# Altium integrated library Integrated_Library11.IntLib: 17 symbols
Pins are listed as number, name and electrical type; pins without a type are passive.

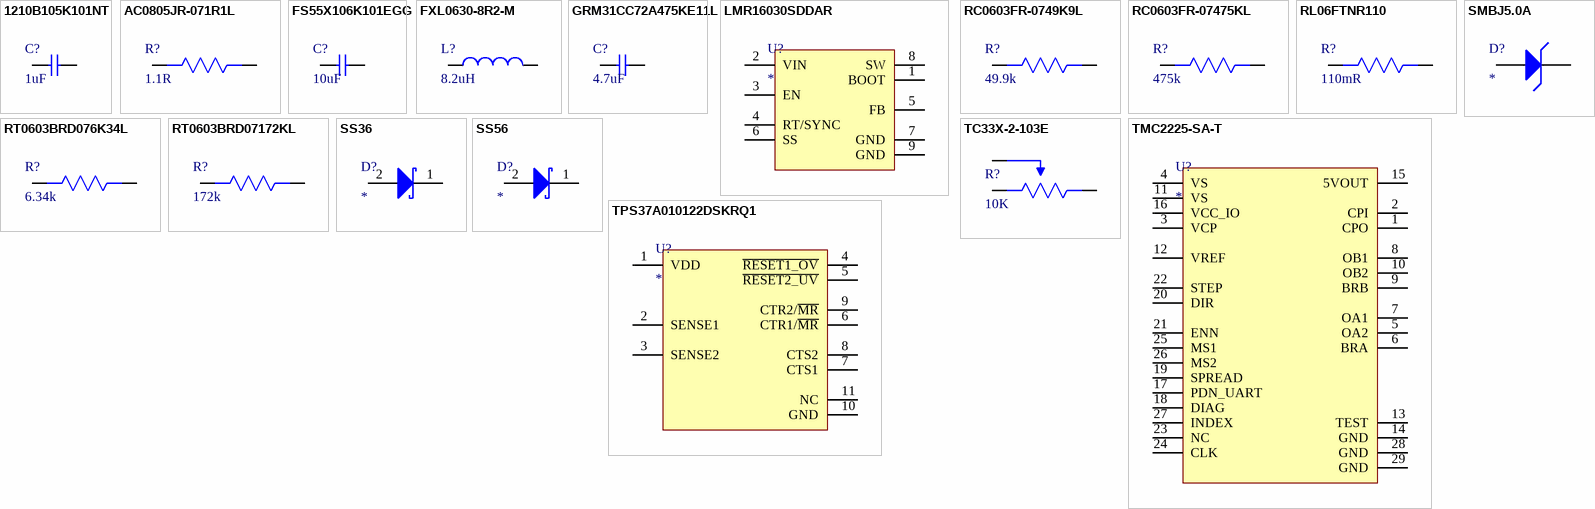
[diagram p0: symbols 1210B105K101NT to TPS37A010122DSKRQ1]

## 1210B105K101NT
designator C?, comment 1uF
100V 1uF X7R ±10% 1210 Multilayer Ceramic Capacitors MLCC - SMD/SMT ROHS
pins: 1, 2

## AC0805JR-071R1L
designator R?, comment 1.1R
pins: 1, 2

## FS55X106K101EGG
designator C?, comment 10uF
100V 10uF ±10% 2220 Multilayer Ceramic Capacitors MLCC - SMD/SMT ROHS
pins: 1, 2

## FXL0630-8R2-M
designator L?, comment 8.2uH
5A 8.2uH ±20% 54mΩ 6A SMD,7x6.6x2.8mm Power Inductors ROHS; Manufacturer: Cjiang; Manufacturer Part Number: FXL0630-8R2-M; LCSC Part Number: C167222; Item Type: Inductor
footprint FXL0630-8R2-M
pins: 1, 2

## GRM31CC72A475KE11L
designator C?, comment 4.7uF
Cap Ceramic 4.7uF 100V X7S 10% SMD 1206 125°C Emboss T/R; Manufacturer: Murata; Manufacturer Part Number: GRM31CC72A475KE11L; Item Type: Capacitor; Supplier 1: Avnet; RoHS: Yes; Category: Ceramic Capacitors; Stock 1: 28000; Pricing 1: 2000=0.31450, 4000=0.29750, 8000=0.28050, 12000=0.26350, 16000=0.24650, 20000=0.22950, 200000=0.21250 (USD); RoHS Compliant: Yes; ComponentLink1URL: https://search.murata.co.jp/Ceramy/image/img/A01X/G101/ENG/GRM31CC72A475KE11-01A.pdf?src-supplier=Digi-Key; ComponentLink1Description: https://search.murata.co.jp/Ceramy/image/img/A01X/G101/ENG/GRM31CC72A475KE11-01A.pdf?src-supplier=Digi-Key; Supplier Part Number 1: GRM31CC72A475KE11L; LCSC Part Number: C237304
footprint Cap-1206
pins: 1, 2

## LMR16030SDDAR
designator U?
Buck Switching Regulator IC Positive Adjustable 0.8V 1 Output 3A 8-SOIC (0.154, 3.90mm Width) Exposed Pad; Manufacturer: Texas Instruments; Manufacturer Part Number: LMR16030SDDAR; Quiescent Current: 40uA; Supplier 1: Digi-Key; RoHS: Yes; Category: Voltage Regulators - Switching; Stock 1: 10434; Pricing 1: 1=4.08000, 10=3.66300, 25=3.46320, 100=3.00130, 250=2.84736, 500=2.55494, 1000=2.17800 (USD); Number of Pins: 8; Min Operating Temperature: -40°C; Max Operating Temperature: 125°C; Lead Free: Lead Free; RoHS Compliant: Yes; ComponentLink1URL: http://www.ti.com/lit/ds/symlink/lmr16030.pdf?src-supplier=Digi-Key; ComponentLink1Description: http://www.ti.com/lit/ds/symlink/lmr16030.pdf?src-supplier=Digi-Key; ComponentLink2URL: http://www.ti.com/general/docs/suppproductinfo.tsp?distId=10&amp;gotoUrl=http%3A%2F%2Fwww.ti.com%2Flit%2Fgpn%2Flmr16030&src-supplier=Digi-Key; ComponentLink2Description: http://www.ti.com/general/docs/suppproductinfo.tsp?distId=10&amp;gotoUrl=http%3A%2F%2Fwww.ti.com%2Flit%2Fgpn%2Flmr16030&src-supplier=Digi-Key; Supplier Part Number 1: 296-47797-1-ND; LCSC Part Number: C136648; Item Type: IC
footprint 8-HSOIC
pins: 1 BOOT, 2 VIN, 3 EN, 4 RT/SYNC, 5 FB, 6 SS, 7 GND, 8 SW, 9 GND

## RC0603FR-0749K9L
designator R?, comment 49.9k
RES 49.9K OHM 1% 1/10W 0603
footprint Res-0603
footprint Res-0603
pins: 1, 2

## RC0603FR-07475KL
designator R?, comment 475k
RES 475K OHM 1% 1/10W 0603; Manufacturer: YAGEO; Manufacturer Part Number: RC0603FR-07475KL; Item Type: Resistor; LCSC Part Number: C137717
footprint Res-0603
pins: 1, 2

## RL06FTNR110
designator R?, comment 110mR
110mΩ ±1% 0603 Current Sense Resistors/Shunt Resistors ROHS
pins: 1, 2

## RT0603BRD076K34L
designator R?, comment 6.34k
Res Thin Film 0603 76.3K Ohm0.1% 1/10W ±25ppm/°C Molded SMD Paper T/R; Manufacturer: Yageo; Manufacturer Part Number: RT0603BRD076K34L; Resistance: 6.34kR; Power Rating: 100mW; Tolerance: 0.1%; Voltage Rating: 75V; Voltage Rating (DC): 50V; Item Type: Resistor; Supplier 1: Digi-Key; RoHS: Yes; Category: Chip SMD Resistors; Stock 1: 15385; Pricing 1: 1=0.34000, 10=0.28800, 100=0.11260, 500=0.06812, 1000=0.04716, 2500=0.04322 (USD); Case/Package: 0603; Case Code (Imperial): 0603; Case Code (Metric): 1608; Weight: 7.1E-05oz; Min Operating Temperature: -55°C; Max Operating Temperature: 125°C; Packaging: Tape and Reel; Termination: SMD/SMT; Temperature Coefficient: 25ppm/°C; Series: RT; Length: 1.6mm; Width: 0.8mm; Height: 0.45mm; Lead Free: Lead Free; RoHS Compliant: Yes; ComponentLink1URL: https://datasheet.ciiva.com/12811/pyu-rt-1-to-0-05-rohs-l-4-12811741.pdf?src-supplier=Mouser; ComponentLink1Description: https://datasheet.ciiva.com/12811/pyu-rt-1-to-0-05-rohs-l-4-12811741.pdf?src-supplier=Mouser; LCSC Part Number: C861532; Supplier Part Number 1: YAG4590CT-ND
footprint Res-0603
pins: 1, 2

## RT0603BRD07172KL
designator R?, comment 172k
RES 172K OHM 0.1% 1/10W 0603; Manufacturer: Yageo; Manufacturer Part Number: RT0603BRD07172KL; Resistance: 172kR; Max Power Dissipation: 100mW; Temperature Coefficient: 25ppm/°C; Item Type: Resistor; Supplier 1: Mouser; RoHS: Yes; Category: Chip SMD Resistors; Stock 1: 2756; Pricing 1: 1=0.33000, 10=0.27400, 50=0.27400, 100=0.10800, 1000=0.04500, 10000=0.03400 (USD); Case/Package: 0603; Min Operating Temperature: -55°C; Max Operating Temperature: 155°C; Resistor Type: Thin Film; Packaging: Tape and Reel; Tolerance: 0.1%; Number of Terminations: 2; RoHS Compliant: Yes; ComponentLink1URL: http://www.yageo.com/documents/recent/PYu-RT_1-to-0.01_RoHS_L_9.pdf?src-supplier=Digi-Key; ComponentLink1Description: http://www.yageo.com/documents/recent/PYu-RT_1-to-0.01_RoHS_L_9.pdf?src-supplier=Digi-Key; Supplier Part Number 1: 603-RT0603BRD07172KL; LCSC Part Number: C861162
footprint Res-0603
pins: 1, 2

## SMBJ5.0A
designator D?
pins: 1 K, 2 A

## SS36
designator D?
Schottky Barrier Diode SK36, DO-214AB, 3A/60V; Manufacturer: ON Semiconductor / Fairchild; Manufacturer Part Number: SS36; Output Current: 3A; Element Configuration: Single; Forward Voltage: 750mV; Max Repetitive Reverse Voltage (Vrrm): 60V; Max Forward Surge Current (Ifsm): 100A; Max Reverse Current: 500uA; Polarity: Standard; Power Dissipation: 2.27W; Supplier 1: Rs; RoHS: Yes; Category: Schottky Diodes; Stock 1: 100; Pricing 1: 100=0.43800, 500=0.34200, 1000=0.27800, 3000=0.25000 (GBP); Mount: Surface Mount; Case/Package: SMC; Number of Pins: 2; Min Operating Temperature: -55°C; Max Operating Temperature: 150°C; Packaging: Tape and Reel; Package Quantity: 3000; Series: -; Forward Current: 3A; Peak Non-Repetitive Surge Current: 100A; Voltage Rating (DC): 60V; Current Rating: 3A; Max Surge Current: 100A; Average Rectified Current: 3A; Max Reverse Leakage Current: 500uA; Max Reverse Voltage (DC): 60V; Current: 3A; Voltage: 60V; Radiation Hardening: No; RoHS Compliant: Yes; Reach SVHC Compliant: Yes; Lead Free: Lead Free; ComponentLink1URL: https://datasheet.ciiva.com/4714/ss36-197193-4714610.pdf?src-supplier=Mouser; ComponentLink1Description: https://datasheet.ciiva.com/4714/ss36-197193-4714610.pdf?src-supplier=Mouser; ComponentLink2URL: https://datasheet.ciiva.com/16889/ss36-16889545.pdf?src-supplier=Future+Electronics; ComponentLink2Description: https://datasheet.ciiva.com/16889/ss36-16889545.pdf?src-supplier=Future+Electronics; ComponentLink3URL: https://datasheet.ciiva.com/920/ss34-920433.pdf?src-supplier=Digi-Key; ComponentLink3Description: https://datasheet.ciiva.com/920/ss34-920433.pdf?src-supplier=Digi-Key; ComponentLink4URL: https://datasheet.ciiva.com/920/ss34-920434.pdf?src-supplier=Digi-Key; ComponentLink4Description: https://datasheet.ciiva.com/920/ss34-920434.pdf?src-supplier=Digi-Key; ComponentLink5URL: https://datasheet.ciiva.com/920/ss34-920435.pdf?src-supplier=Digi-Key; ComponentLink5Description: https://datasheet.ciiva.com/920/ss34-920435.pdf?src-supplier=Digi-Key; Supplier Part Number 1: 9034425P; LCSC Part Number: C16015; Item Type: Diode
footprint SMA(DO-214AC)
pins: 1 K, 2 A

## SS56
designator D?
DIODE SCHOTTKY 60V 5A SMA; Manufacturer Part Number: SS56; Manufacturer: MDD; LCSC Par Number: C65009; Iterm Type: Diode
footprint SMA(DO-214AC)
pins: 1 K, 2 A

## TC33X-2-103E
designator R?, comment 10K
pins: 1 CCW, 2 Wiper, 3 CW

## TMC2225-SA-T
designator U?
HTSSOP-28-EP-4.5mm Motor Driver ICs ROHS; Manufacturer: Trinamic; Manufacturer Part Number: TMC2225-SA-T; Supplier 1: Digi-Key; RoHS: No; Stock 1: 3967; Pricing 1: 1=3.51000, 10=3.15400, 25=2.98120, 100=2.58380, 250=2.45124, 500=2.19950, 1000=1.87500 (USD); Supplier Part Number 1: 1460-TMC2225-SA-TCT-ND
pins: 1 CPO, 2 CPI, 3 VCP, 4 VS, 5 OA2, 6 BRA, 7 OA1, 8 OB1, 9 BRB, 10 OB2, 11 VS, 12 VREF, 13 TEST, 14 GND, 15 5VOUT, 16 VCC_IO, 17 PDN_UART, 18 DIAG, 19 SPREAD, 20 DIR, 21 ENN, 22 STEP, 23 NC, 24 CLK, 25 MS1, 26 MS2, 27 INDEX, 28 GND, 29 GND

## TPS37A010122DSKRQ1
designator U?
Automotive 65-V window supervisor with ultra-low quiescent current and time-delay function 10-SON -40 to 125; Manufacturer: Texas Instruments; Manufacturer Part Number: TPS37A010122DSKRQ1; Item Type: IC; Supplier 1: Mouser; RoHS: No; Category: Voltage Supervisors; Stock 1: 2999; Pricing 1: 1=4.29000, 10=3.86000, 50=3.65000, 100=3.16000, 1000=2.35000, 10000=2.34000 (USD); LCSC Part Number: C3686483; Supplier Part Number 1: 595-S37A010122DSKRQ1
footprint WSON-10(2.5x2.5)
pins: 1 VDD, 2 SENSE1, 3 SENSE2, 4 ~{RESET1_OV}, 5 ~{RESET2_UV}, 6 CTR1/~{MR}, 7 CTS1, 8 CTS2, 9 CTR2/~{MR}, 10 GND, 11 NC